# Altium schematic symbol library AQ3130-01ETG.SchLib: 1 symbol
Pins are listed as number, name and electrical type; pins without a type are passive.

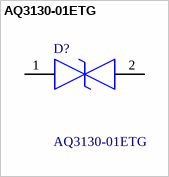
[diagram p0: symbol AQ3130-01ETG]

## AQ3130-01ETG
designator D?
ESD Suppressors / TVS Diodes 0.3pF 10KV AEC-Q101; Manufacturer_Name: LITTELFUSE; Geometry.Height: 0.6mm; Mouser Part Number: 576-AQ3130-01ETG; Mouser Price/Stock: https://www.mouser.co.uk/ProductDetail/Littelfuse/AQ3130-01ETG?qs=AQlKX63v8RuGigjCJJkgEA%3D%3D; Manufacturer_Part_Number: AQ3130-01ETG; Datasheet Link: https://www.arrow.com/en/products/aq3130-01etg/littelfuse
footprint AQ313001ETG
pins: 1, 2